# Altium footprint library VEML6030.PcbLib: 1 footprints
Each footprint in its own frame and in the unit in brackets; x right, y up, seen from the top. Pads: shape width x height; smd on the part's side, far side on the other; paste and mask are expansions set on the pad; w line width, h text height; cw(c..) or ccw(c..) is an arc to the next point about the centre after c.
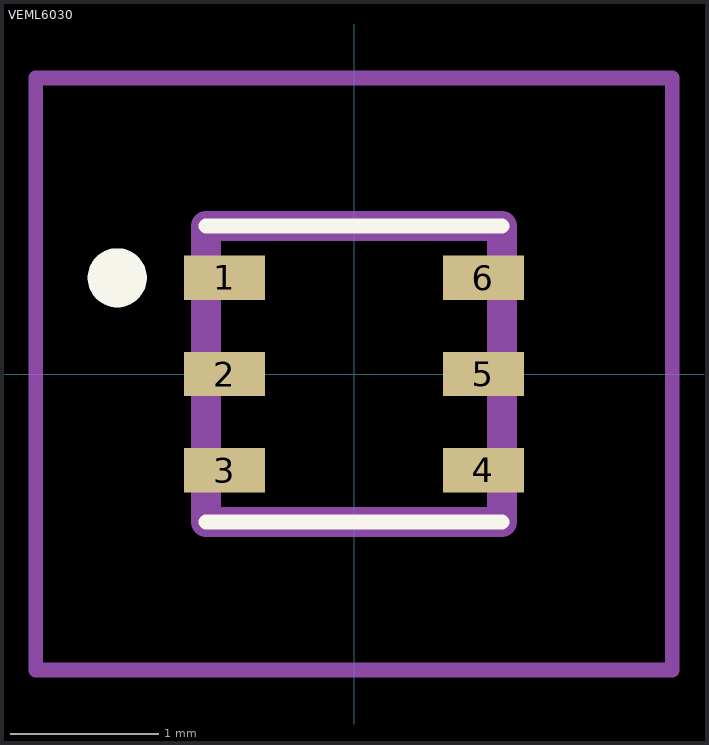
[diagram p0: the footprint, top view; thin cyan lines are the x and y axes]

## VEML6030 [mm]
pads (6):
  rect 0.55x0.3 smd: 1(-0.875,0.65) 2(-0.875,0) 3(-0.875,-0.65) 4(0.875,-0.65) 5(0.875,0) 6(0.875,0.65)
Top Overlay:
  lines w0.1: -1,-1 1,-1 ; -1,1 1,1
  lines w0.2: -1.7,0.65 cw(c-1.6,0.65) -1.5,0.65 ; -1.7,0.65 -1.7,0.65 ; -1.7,0.65 ccw(c-1.6,0.65) -1.5,0.65 ; -1.5,0.65 -1.5,0.65
Mechanical 15:
  lines w0.2: -1,-1 1,-1 1,1 -1,1 -1,-1
Mechanical 20:
  lines w0.1: -2.15,-2 2.15,-2 2.15,2 -2.15,2 -2.15,-2